# Altium footprint library PCB8.PcbLib: 32 footprints (part 2 of 2)
Each footprint in its own frame and in the unit in brackets; x right, y up, seen from the top. Pads: shape width x height; smd on the part's side, far side on the other; paste and mask are expansions set on the pad; w line width, h text height; cw(c..) or ccw(c..) is an arc to the next point about the centre after c.
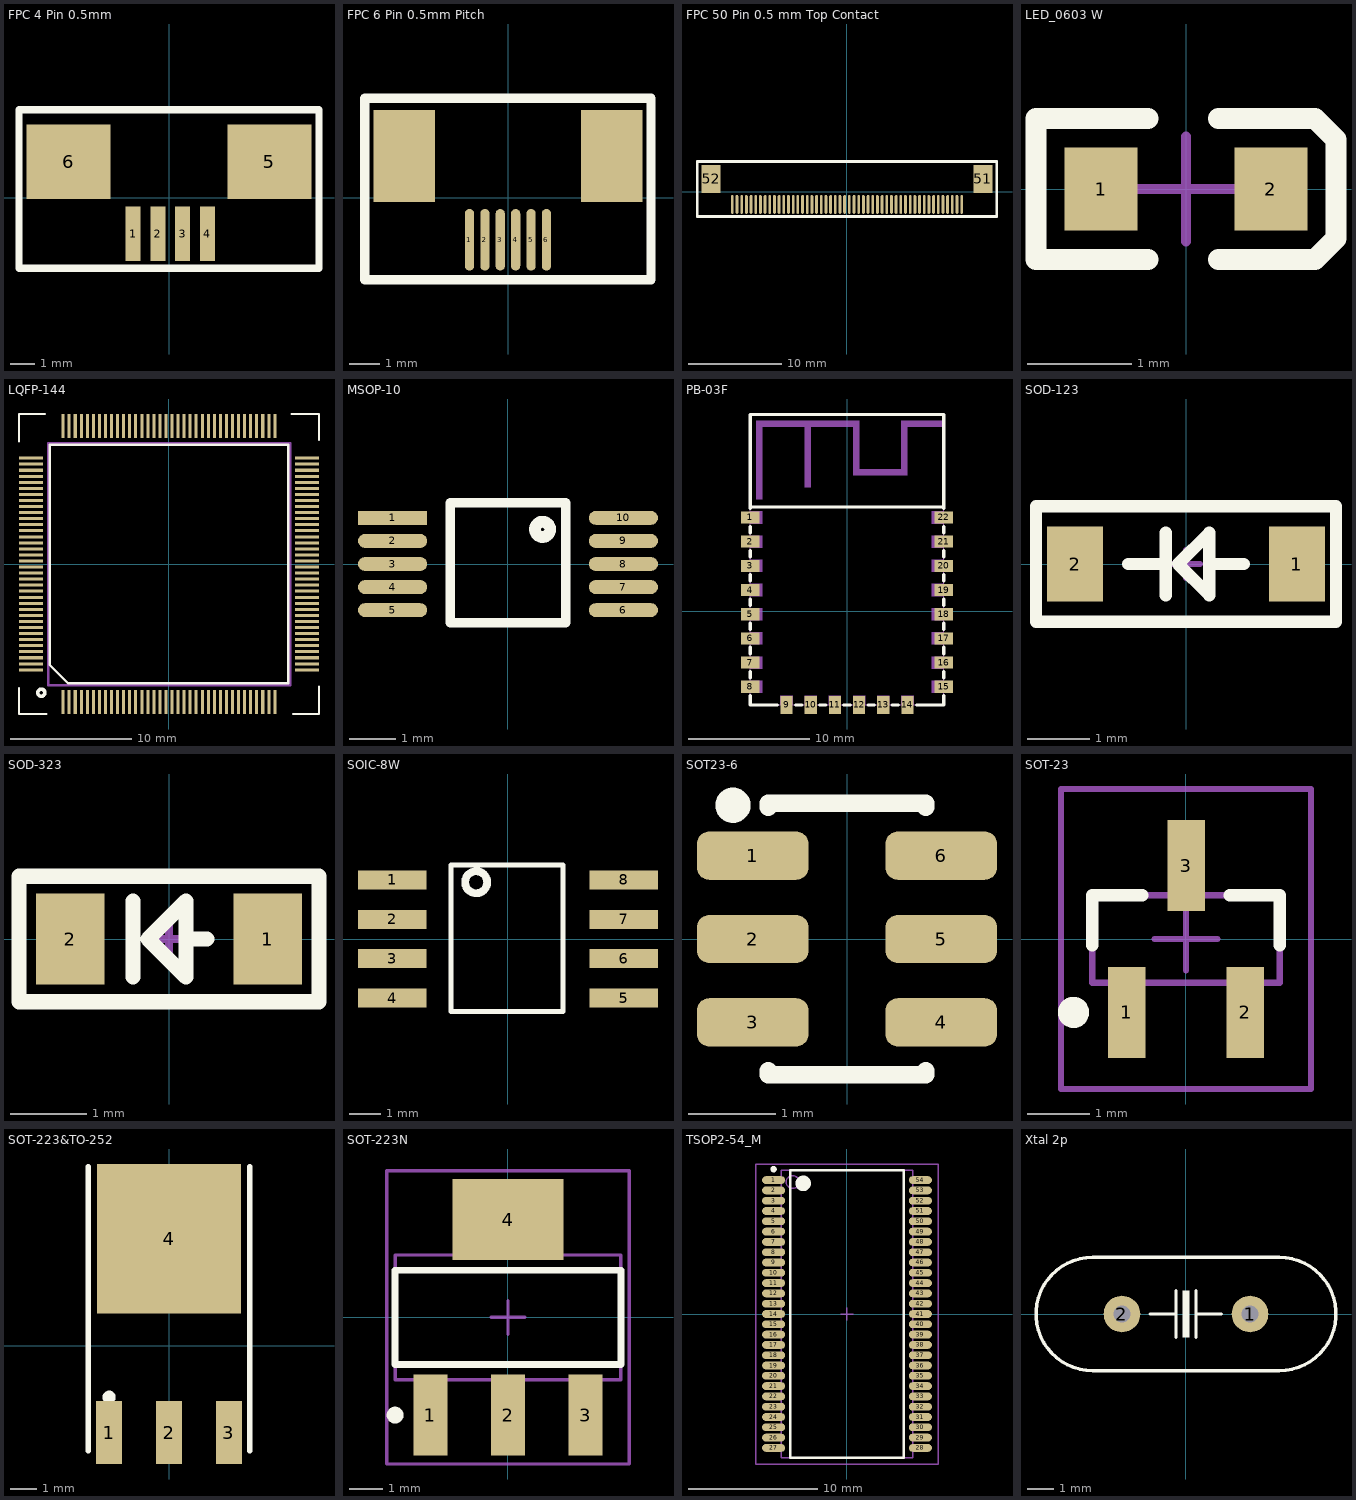
[diagram p1: the footprints below, top view; thin cyan lines are the x and y axes]

## FPC 4 Pin 0.5mm [mm]
height 4.9
pads (6):
  rect 0.6x2.2 smd: 1(-1.45,-1.45) 2(-0.45,-1.45) 3(0.55,-1.45) 4(1.55,-1.45)
  rect 3.4x3 smd: 5(4.05,1.45) 6(-4.05,1.45)
Top Overlay:
  lines w0.3: -6.05,-2.85 6.05,-2.85 6.05,3.55 -6.05,3.55 -6.05,-2.85
3D body "12608.stp": height 2.51, standoff -0.07, extent -5.91,-2.96 6.01,3.59

## FPC 6 Pin 0.5mm Pitch [mm]
height 1.8
pads (8):
  oval 0.3x2 smd mask+0.04: 1(-1.251,-1.361) 2(-0.751,-1.361) 3(-0.251,-1.361) 4(0.249,-1.361) 5(0.749,-1.361) 6(1.249,-1.361)
  rect 2x3 smd: ""(-3.374,1.361) ""(3.374,1.361)
Top Overlay:
  lines w0.3: -4.651,-2.661 -4.651,3.24 4.649,3.24 4.649,-2.661 -4.651,-2.661

## FPC 50 Pin 0.5 mm Top Contact [mm]
pads (52):
  oval 0.3x2 smd mask+0.04: 1(-12.251,-1.361) 2(-11.751,-1.361) 3(-11.251,-1.361) 4(-10.751,-1.361) 5(-10.251,-1.361) 6(-9.751,-1.361) 7(-9.251,-1.361) 8(-8.751,-1.361) 9(-8.251,-1.361) 10(-7.751,-1.361) 11(-7.251,-1.361) 12(-6.751,-1.361) 13(-6.251,-1.361) 14(-5.751,-1.361) 15(-5.251,-1.361) 16(-4.751,-1.361) 17(-4.251,-1.361) 18(-3.751,-1.361) 19(-3.251,-1.361) 20(-2.751,-1.361) 21(-2.251,-1.361) 22(-1.751,-1.361) 23(-1.251,-1.361) 24(-0.751,-1.361) 26(0.249,-1.361) 27(0.749,-1.361) 28(1.249,-1.361) 29(1.749,-1.361) 30(2.249,-1.361) 31(2.749,-1.361) 32(3.249,-1.361) 33(3.749,-1.361) 34(4.249,-1.361) 35(4.749,-1.361) 36(5.249,-1.361) 37(5.749,-1.361) 38(6.249,-1.361) 39(6.749,-1.361) 40(7.249,-1.361) 41(7.749,-1.361) 42(8.249,-1.361) 43(8.749,-1.361) 44(9.249,-1.361) 45(9.749,-1.361) 46(10.249,-1.361) 47(10.749,-1.361) 48(11.249,-1.361) 49(11.749,-1.361) 50(12.249,-1.361)
  oval 0.3x2 smd paste+0 mask+0.04: 25(-0.251,-1.361)
  rect 2x3 smd: 51(14.524,1.361) 52(-14.524,1.361)
Top Overlay:
  lines w0.3: -16,-2.661 16,-2.661 16,3.24 -16,3.24 -16,-2.661
3D body "fpc-50-050-sht-r.stp": height 2.02, standoff -0.02, extent -15.25,-2.45 15.25,2.95

## LED_0603 W [mm]
height 4.9
pads (2):
  rect 0.7x0.8 smd: 1(-0.813,0) 2(0.813,0)
Top Overlay:
  lines w0.2: -0.363,-0.675 -1.438,-0.675 -1.438,0.675 -0.363,0.675 ; 0.313,-0.675 1.238,-0.675 1.438,-0.475 1.438,0.475 1.238,0.675 0.313,0.675
Mechanical 15:
  lines w0.1: -0.5,0 0.5,0 ; 0,-0.5 0,0.5
3D body "User Library-LED_0603_WS.STEP": height 0.6, standoff 0, extent -0.8,-0.4 0.8,0.4

## LQFP-144 [mm]
height 1.8
pads (144):
  rect 0.25x2 smd mask+0.05: 1(-8.75,-11.4) 2(-8.25,-11.4) 3(-7.75,-11.4) 4(-7.25,-11.4) 5(-6.75,-11.4) 6(-6.25,-11.4) 7(-5.75,-11.4) 8(-5.25,-11.4) 9(-4.75,-11.4) 10(-4.25,-11.4) 11(-3.75,-11.4) 12(-3.25,-11.4) 13(-2.75,-11.4) 14(-2.25,-11.4) 15(-1.75,-11.4) 16(-1.25,-11.4) 17(-0.75,-11.4) 18(-0.25,-11.4) 19(0.25,-11.4) 20(0.75,-11.4) 21(1.25,-11.4) 22(1.75,-11.4) 23(2.25,-11.4) 24(2.75,-11.4) 25(3.25,-11.4) 26(3.75,-11.4) 27(4.25,-11.4) 28(4.75,-11.4) 29(5.25,-11.4) 30(5.75,-11.4) 31(6.25,-11.4) 32(6.75,-11.4) 33(7.25,-11.4) 34(7.75,-11.4) 35(8.25,-11.4) 36(8.75,-11.4) 73(8.75,11.4) 74(8.25,11.4) 75(7.75,11.4) 76(7.25,11.4) 77(6.75,11.4) 78(6.25,11.4) 79(5.75,11.4) 80(5.25,11.4) 81(4.75,11.4) 82(4.25,11.4) 83(3.75,11.4) 84(3.25,11.4) 85(2.75,11.4) 86(2.25,11.4) 87(1.75,11.4) 88(1.25,11.4) 89(0.75,11.4) 90(0.25,11.4) 91(-0.25,11.4) 92(-0.75,11.4) 93(-1.25,11.4) 94(-1.75,11.4) 95(-2.25,11.4) 96(-2.75,11.4) 97(-3.25,11.4) 98(-3.75,11.4) 99(-4.25,11.4) 100(-4.75,11.4) 101(-5.25,11.4) 102(-5.75,11.4) 103(-6.25,11.4) 104(-6.75,11.4) 105(-7.25,11.4) 106(-7.75,11.4) 107(-8.25,11.4) 108(-8.75,11.4)
  rect 2x0.25 smd mask+0.05: 37(11.4,-8.75) 38(11.4,-8.25) 39(11.4,-7.75) 40(11.4,-7.25) 41(11.4,-6.75) 42(11.4,-6.25) 43(11.4,-5.75) 44(11.4,-5.25) 45(11.4,-4.75) 46(11.4,-4.25) 47(11.4,-3.75) 48(11.4,-3.25) 49(11.4,-2.75) 50(11.4,-2.25) 51(11.4,-1.75) 52(11.4,-1.25) 53(11.4,-0.75) 54(11.4,-0.25) 55(11.4,0.25) 56(11.4,0.75) 57(11.4,1.25) 58(11.4,1.75) 59(11.4,2.25) 60(11.4,2.75) 61(11.4,3.25) 62(11.4,3.75) 63(11.4,4.25) 64(11.4,4.75) 65(11.4,5.25) 66(11.4,5.75) 67(11.4,6.25) 68(11.4,6.75) 69(11.4,7.25) 70(11.4,7.75) 71(11.4,8.25) 72(11.4,8.75) 109(-11.4,8.75) 110(-11.4,8.25) 111(-11.4,7.75) 112(-11.4,7.25) 113(-11.4,6.75) 114(-11.4,6.25) 115(-11.4,5.75) 116(-11.4,5.25) 117(-11.4,4.75) 118(-11.4,4.25) 119(-11.4,3.75) 120(-11.4,3.25) 121(-11.4,2.75) 122(-11.4,2.25) 123(-11.4,1.75) 124(-11.4,1.25) 125(-11.4,0.75) 126(-11.4,0.25) 127(-11.4,-0.25) 128(-11.4,-0.75) 129(-11.4,-1.25) 130(-11.4,-1.75) 131(-11.4,-2.25) 132(-11.4,-2.75) 133(-11.4,-3.25) 134(-11.4,-3.75) 135(-11.4,-4.25) 136(-11.4,-4.75) 137(-11.4,-5.25) 138(-11.4,-5.75) 139(-11.4,-6.25) 140(-11.4,-6.75) 141(-11.4,-7.25) 142(-11.4,-7.75) 143(-11.4,-8.25) 144(-11.4,-8.75)
Top Overlay:
  circle w0.3: c-10.555,-10.638 r0.293
  lines w0.2: -12.4,-10.275 -12.4,-12.4 -10.15,-12.4 ; -12.4,10.15 -12.4,12.4 -10.275,12.4 ; 10.15,12.4 12.4,12.4 12.4,10.275 ; 10.275,-12.4 12.4,-12.4 12.4,-10.15 ; -9.865,-8.33 -9.865,9.865 9.865,9.865 9.865,-9.865 -8.33,-9.865 -9.865,-8.33
Mechanical 1:
  lines w0.2: -9.98,-10.02 -9.98,9.98 10.02,9.98 10.02,-10.02 -9.98,-10.02
3D body "User Library-LQFP144_STM32F4.STEP": height 2, standoff 0.1, extent -11,-11 11,11

## MSOP-10 [mm]
pads (10):
  rect 1.5x0.3 smd mask+0.05: 1(-2.5,1)
  oval 1.5x0.3 smd mask+0.05: 2(-2.5,0.5) 3(-2.5,0) 4(-2.5,-0.5) 5(-2.5,-1) 6(2.5,-1) 7(2.5,-0.5) 8(2.5,0) 9(2.5,0.5) 10(2.5,1)
Top Overlay:
  circle w0.254: c0.75,0.75 r0.165
  lines w0.2: -1.25,-1.275 -1.25,1.325 1.25,1.325 1.25,-1.275 -1.25,-1.275
3D body "User Library-MSOP-10-1.STEP": height 1.05, standoff 0, extent -2.514,-1.5 2.514,1.5

## PB-03F [mm]
height 4.9
pads (22):
  rect 1.5x1 smd paste+0 mask+0.05: 1(-8,7.75) 2(-8,5.75) 3(-8,3.75) 4(-8,1.75) 5(-8,-0.25) 6(-8,-2.25) 7(-8,-4.25) 8(-8,-6.25) 15(8,-6.25) 16(8,-4.25) 17(8,-2.25) 18(8,-0.25) 19(8,1.75) 20(8,3.75) 21(8,5.75) 22(8,7.75)
  rect 1x1.5 smd paste+0 mask+0.05: 9(-5,-7.75) 10(-3,-7.75) 11(-1,-7.75) 12(1,-7.75) 13(3,-7.75) 14(5,-7.75)
Top Overlay:
  lines w0.254: -8,-6.981 -8,-7.75 -5.731,-7.75 ; -8,-5.519 -8,-4.981 ; -8,-3.519 -8,-2.981 ; -8,-1.519 -8,-0.981 ; -8,0.481 -8,1.019 ; -8,2.481 -8,3.019 ; -8,4.481 -8,5.019 ; -8,6.481 -8,7.019 ; -8,8.481 -8,16.25 8,16.25 8,8.481 ; -8,8.613 8,8.613 ; -4.269,-7.75 -3.731,-7.75 ; -2.269,-7.75 -1.731,-7.75 ; -0.269,-7.75 0.269,-7.75 ; 1.731,-7.75 2.269,-7.75 ; 3.731,-7.75 4.269,-7.75 ; 5.731,-7.75 8,-7.75 8,-6.981 ; 8,-5.519 8,-4.981 ; 8,-3.519 8,-2.981 ; 8,-1.519 8,-0.981 ; 8,0.481 8,1.019 ; 8,2.481 8,3.019 ; 8,4.481 8,5.019 ; 8,6.481 8,7.019
Mechanical 6:
  region: -7.5,9.25 -7.5,15.75 -7,15.75 -7,9.25
  region: -7,15.75 -3,15.75 -3,15.25 -7,15.25
  region: -3,15.25 -3,10.25 -3.5,10.25 -3.5,15.25
  region: -3,15.75 0.5,15.75 0.5,15.25 -3,15.25
  region: 0.5,15.75 0.5,11.25 1,11.25 1,15.75
  region: 1,11.25 4.5,11.25 4.5,11.75 1,11.75
  region: 4.5,11.25 4.5,15.75 5,15.75 5,11.25
  region: 5,15.75 8,15.75 8,15.25 5,15.25
Mechanical 15:
  region: -7.94,16.25 -7.941,16.274 -7.976,16.308 -8.024,16.308 -8.059,16.274 -8.06,16.25 -8.059,16.226 -8.024,16.192 -7.976,16.192 -7.941,16.226 -7.94,16.25
  region: 7,8.25 8,8.25 8,7.25 7,7.25
  region: 7,6.25 8,6.25 8,5.25 7,5.25
  region: 7,4.25 8,4.25 8,3.25 7,3.25
  region: 7,2.25 8,2.25 8,1.25 7,1.25
  region: 7,0.25 8,0.25 8,-0.75 7,-0.75
  region: 7,-1.75 8,-1.75 8,-2.75 7,-2.75
  region: 7,-3.75 8,-3.75 8,-4.75 7,-4.75
  region: 7,-5.75 8,-5.75 8,-6.75 7,-6.75
  region: -8,-5.75 -7,-5.75 -7,-6.75 -8,-6.75
  region: -8,-3.75 -7,-3.75 -7,-4.75 -8,-4.75
  region: -8,-1.75 -7,-1.75 -7,-2.75 -8,-2.75
  region: -8,0.25 -7,0.25 -7,-0.75 -8,-0.75
  region: -8,2.25 -7,2.25 -7,1.25 -8,1.25
  region: -8,4.25 -7,4.25 -7,3.25 -8,3.25
  region: -8,6.25 -7,6.25 -7,5.25 -8,5.25
  region: -8,8.25 -7,8.25 -7,7.25 -8,7.25
  region: 4.5,-7.75 4.5,-7 5.5,-7 5.5,-7.75
  region: 2.5,-7.75 2.5,-7 3.5,-7 3.5,-7.75
  region: 0.5,-7.75 0.5,-7 1.5,-7 1.5,-7.75
  region: -1.5,-7.75 -1.5,-7 -0.5,-7 -0.5,-7.75
  region: -3.5,-7.75 -3.5,-7 -2.5,-7 -2.5,-7.75
  region: -5.5,-7.75 -5.5,-7 -4.5,-7 -4.5,-7.75
  lines w0.051: -8,-7.75 -8,16.25 8,16.25 8,-7.75 -8,-7.75

## SOD-123 [mm]
height 4.9
pads (2):
  rect 0.9x1.2 smd: 1(1.775,0) 2(-1.775,0)
Top Overlay:
  lines w0.2: -0.925,0 -0.325,0 ; -0.325,-0.5 -0.325,0.5 ; 0.375,0 0.925,0 ; -2.4,-0.925 2.4,-0.925 2.4,0.925 -2.4,0.925 -2.4,-0.925 ; -0.125,0 0.375,0.5 0.375,-0.5 -0.125,0
Mechanical 1:
  lines w0.1: -0.225,0 0.225,0 ; 0,-0.225 0,0.225
3D body "User Library-SOD123.STEP": height 1.27, standoff 0, extent -1.85,-0.8 1.85,0.8

## SOD-323 [mm]
height 1.8
pads (2):
  rect 0.9x1.2 smd: 1(1.3,0) 2(-1.3,0)
Top Overlay:
  lines w0.2: -0.475,-0.5 -0.475,0.5 ; 0.225,0 0.5,0 ; -1.975,-0.825 -1.975,0.825 1.975,0.825 1.975,-0.825 -1.975,-0.825 ; -0.275,0 0.225,-0.5 0.225,0.5 -0.275,0
Mechanical 1:
  lines w0.1: -0.225,0 0.225,0 ; 0,-0.225 0,0.225
3D body "User Library-SOD323-1.STEP": height 1.1, standoff 0, extent -1.3,-0.675 1.3,0.675

## SOIC-8W [mil]
height 70.87
pads (8):
  rect 87x24 smd: 1(-146.75,75) 2(-146.75,25) 3(-146.75,-25) 4(-146.75,-75) 5(146.75,-75) 6(146.75,-25) 7(146.75,25) 8(146.75,75)
Top Overlay:
  circle w9.84: c-40.33,71.98 r14
  lines w6: -72.31,-92.01 69.66,-92.01 69.66,93.98 -72.31,93.98 -72.31,-92.01
3D body "User Library-SOIC8_Wide_5mmx5mm.STEP": height 85.24, standoff 1.38, extent -158.39,-108.38 159.32,106.58

## SOT23-6 [mm]
height 1.8
pads (6):
  rrect50% 1.27x0.55 smd paste+0.038 mask+0.038: 1(-1.075,0.95) 2(-1.075,0) 3(-1.075,-0.95) 4(1.075,-0.95) 5(1.075,0) 6(1.075,0.95)
Top Overlay:
  circle w0.3: c-1.3,1.525 r0.05
  lines w0.2: -0.9,-1.5 -0.9,-1.55 0.9,-1.55 0.9,-1.5 ; -0.9,1.5 -0.9,1.55 0.9,1.55 0.9,1.5
3D body "User Library-SOT23-6-2.STEP": height 1.45, standoff 0, extent -1.4,-1.45 1.4,1.45

## SOT-23 [mm]
height 4.9
pads (3):
  rect 0.6x1.45 smd: 1(-0.95,-1.175) 2(0.95,-1.175) 3(0,1.175)
Top Overlay:
  circle w0.25: c-1.8,-1.175 r0.125
  lines w0.2: -1.5,-0.1 -1.5,0.7 -0.7,0.7 ; 0.7,0.7 1.5,0.7 1.5,-0.1
Mechanical 13:
  lines w0.1: -1.5,-0.7 1.5,-0.7 1.5,0.7 -1.5,0.7 -1.5,-0.7
Mechanical 15:
  lines w0.1: -0.5,0 0.5,0 ; 0,-0.5 0,0.5 ; -2,-2.4 2,-2.4 2,2.4 -2,2.4 -2,-2.4
3D body "User Library-N-MOS_BSS123_SOT23.STEP": height 1, standoff 0, extent -1.45,-1.225 1.45,1.075

## SOT-223&TO-252 [mm]
height 2.38
pads (4):
  rect 1x2.4 smd: 1(-2.285,-3.319) 2(0.001,-3.319) 3(2.285,-3.319)
  rect 5.5x5.7 smd: 4(0,4.081)
Top Overlay:
  circle w0.25: c-2.285,-1.969 r0.125
  lines w0.2: -3.085,-4.019 -3.085,6.831 ; 3.085,-4.019 3.085,6.831

## SOT-223N [mm]
height 1.8
pads (4):
  rect 1x2.4 smd: 1(-2.3,-2.9) 2(0,-2.9) 3(2.3,-2.9)
  rect 3.3x2.4 smd: 4(0,2.9)
Top Overlay:
  circle w0.25: c-3.35,-2.9 r0.125
  lines w0.2: -3.35,-1.4 3.35,-1.4 3.35,1.4 -3.35,1.4 -3.35,-1.4
Mechanical 13:
  lines w0.1: -3.35,-1.85 3.35,-1.85 3.35,1.85 -3.35,1.85 -3.35,-1.85
Mechanical 15:
  lines w0.1: -0.5,0 0.5,0 ; 0,-0.5 0,0.5 ; -3.6,-4.35 3.6,-4.35 3.6,4.35 -3.6,4.35 -3.6,-4.35
3D body "TO-223.STEP": height 1.64, standoff -0.04, extent -3.242,-3.49 3.242,3.49

## TSOP2-54_M [mm] "SOP, 54-Leads, Body 22.2x10.16mm, Pitch 0.8mm, IPC Low Density"
height 1.2
pads (54):
  oval 1.8x0.6 smd: 1(-5.7,10.4) 2(-5.7,9.6) 3(-5.7,8.8) 4(-5.7,8) 5(-5.7,7.2) 6(-5.7,6.4) 7(-5.7,5.6) 8(-5.7,4.8) 9(-5.7,4) 10(-5.7,3.2) 11(-5.7,2.4) 12(-5.7,1.6) 13(-5.7,0.8) 14(-5.7,0) 15(-5.7,-0.8) 16(-5.7,-1.6) 17(-5.7,-2.4) 18(-5.7,-3.2) 19(-5.7,-4) 20(-5.7,-4.8) 21(-5.7,-5.6) 22(-5.7,-6.4) 23(-5.7,-7.2) 24(-5.7,-8) 25(-5.7,-8.8) 26(-5.7,-9.6) 27(-5.7,-10.4) 28(5.7,-10.4) 29(5.7,-9.6) 30(5.7,-8.8) 31(5.7,-8) 32(5.7,-7.2) 33(5.7,-6.4) 34(5.7,-5.6) 35(5.7,-4.8) 36(5.7,-4) 37(5.7,-3.2) 38(5.7,-2.4) 39(5.7,-1.6) 40(5.7,-0.8) 41(5.7,0) 42(5.7,0.8) 43(5.7,1.6) 44(5.7,2.4) 45(5.7,3.2) 46(5.7,4) 47(5.7,4.8) 48(5.7,5.6) 49(5.7,6.4) 50(5.7,7.2) 51(5.7,8) 52(5.7,8.8) 53(5.7,9.6) 54(5.7,10.4)
Top Overlay:
  circle w0.25: c-5.7,11.25 r0.125
  circle w0.6: c-3.4,10.15 r0.3
  lines w0.2: -4.4,-11.15 -4.4,11.15 4.4,11.15 4.4,-11.15 -4.4,-11.15
Mechanical 13:
  circle w0.1: c-4.22,10.25 r0.5
  lines w0.1: -5.12,-11.15 -5.12,11.15 5.12,11.15 5.12,-11.15 -5.12,-11.15
Mechanical 15:
  lines w0.1: -0.5,0 0.5,0 ; 0,-0.5 0,0.5 ; -7.1,-11.65 -7.1,11.65 7.1,11.65 7.1,-11.65 -7.1,-11.65
3D body: height 1.2, standoff 0, extent -5.12,-11.15 5.12,11.15

## Xtal 2p [mil]
height 70.87
pads (2):
  round 55 hole 25: 1(96.06,0) 2(-96.06,0)
Top Overlay:
  region: 5,34.99 -5,34.99 -5,-35.01 5,-35.01
  lines w5: -54,0 -15,0 ; -15,-35 -15,35 ; 15,-35 15,35 ; 15,0 53,0 ; -140,-85 cw(c-140,0) -140,85 140,85 cw(c140,0) 140,-85 -140,-85
3D body "Crystal-3.8mm.STEP": height 140.16, standoff -78.74, extent -226.38,-88.58 226.38,88.58